# Altium footprint library WR-TBL_Pluggable Connector_3.50mm.PcbLib: 175 footprints (part 4 of 11)
Each footprint in its own frame and in the unit in brackets; x right, y up, seen from the top. Pads: shape width x height; smd on the part's side, far side on the other; paste and mask are expansions set on the pad; w line width, h text height; cw(c..) or ccw(c..) is an arc to the next point about the centre after c.
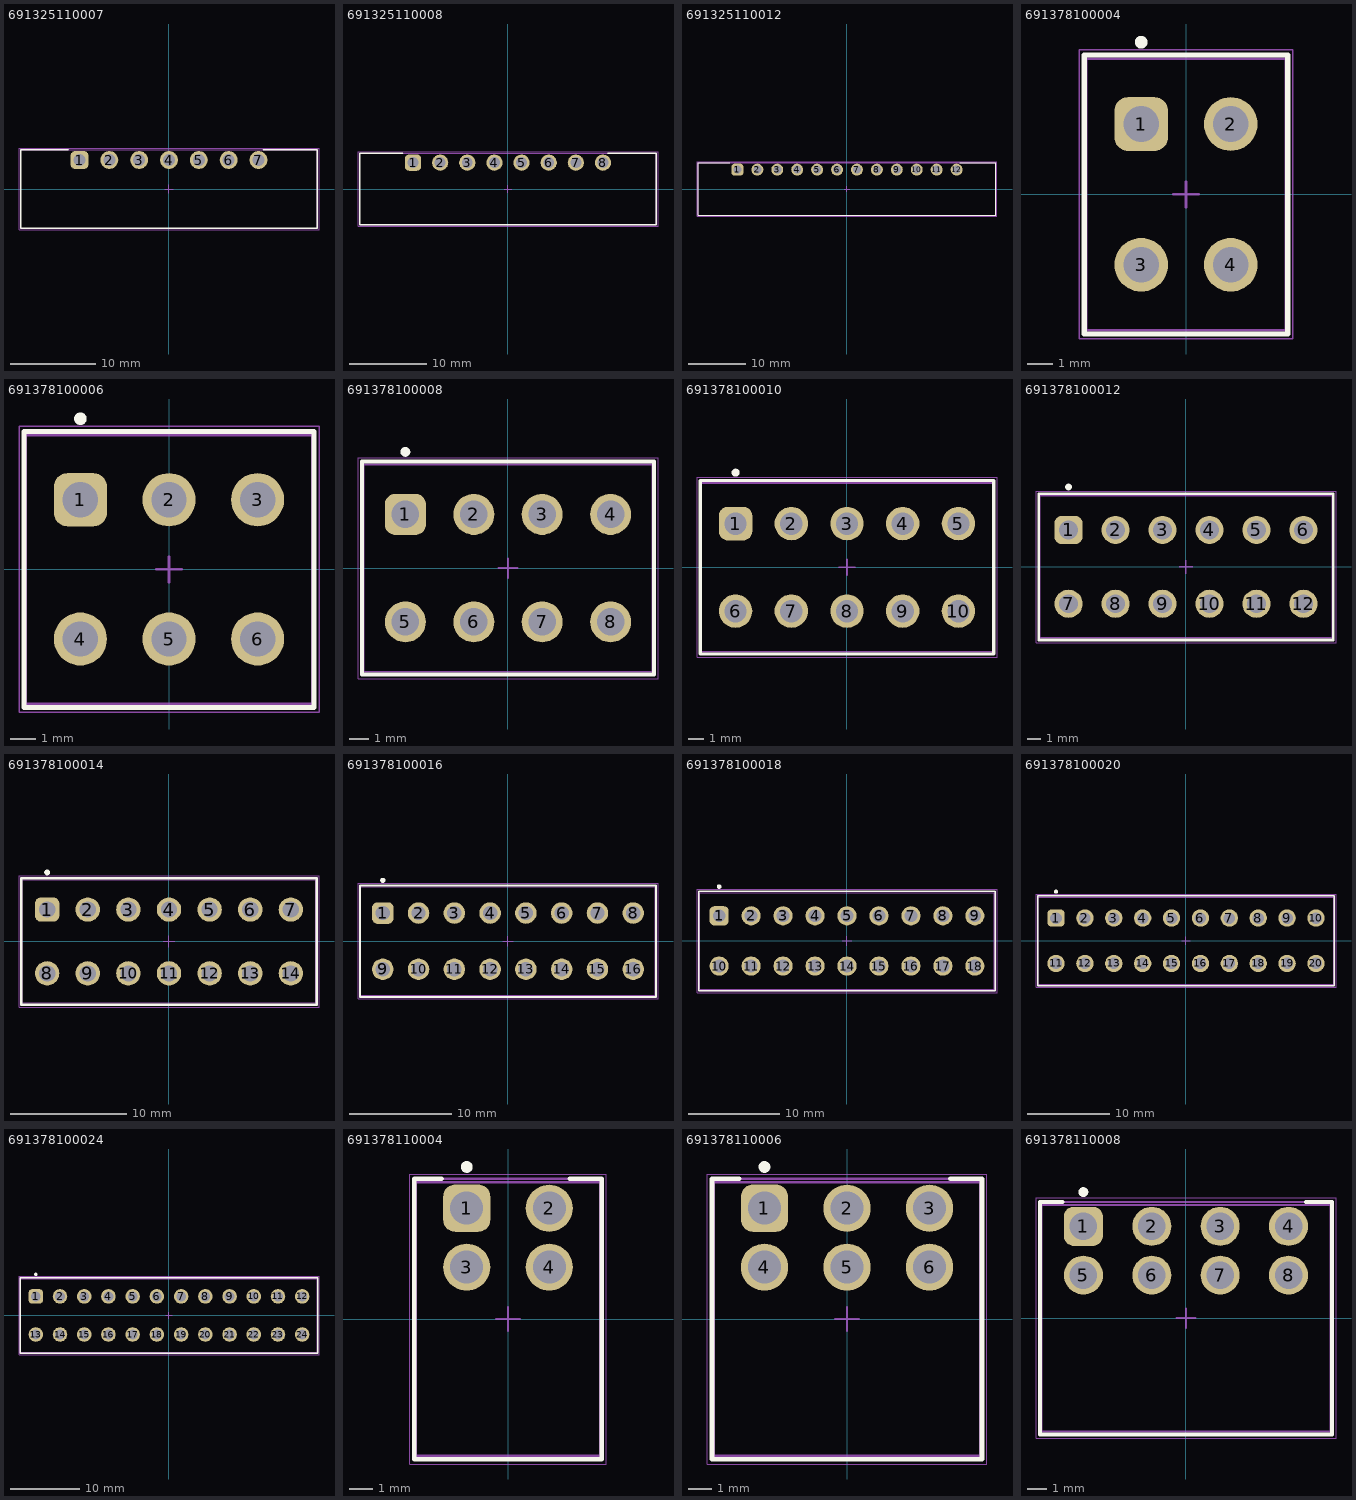
[diagram p3: the footprints below, top view; thin cyan lines are the x and y axes]

## 691325110007 [mm] "Horizontal PCB Header with Flanges, pitch 3.5mm, 07p"
height 7.2
pads (7):
  rrect50% 2.1x2.1 hole 1.4: 1(-10.5,3.4)
  round 2.1 hole 1.4: 2(-7,3.4) 3(-3.5,3.4) 4(0,3.4) 5(3.5,3.4) 6(7,3.4) 7(10.5,3.4)
Top Overlay:
  lines w0.2: -11.85,4.6 -17.4,4.6 -17.4,-4.6 17.4,-4.6 17.4,4.6 11.1,4.6
Top Assembly:
  lines w0.1: -17.4,-4.6 17.4,-4.6 17.4,4.6 -17.4,4.6 -17.4,-4.6
Top Designator:
  text ".Designator" at -3.647,-0.357 h1
Top 3D Body:
  lines w0.1: -17.4,-4.6 -17.4,4.6 17.4,4.6 17.4,-4.6 -17.4,-4.6
Top Courtyard:
  lines w0.05: -17.6,-4.8 -17.6,4.8 17.6,4.8 17.6,-4.8 -17.6,-4.8
Top Component Center:
  lines w0.1: -0.5,0 0.5,0 ; 0,-0.5 0,0.5
3D body "691325110007.stp": height 7.3, standoff -3.4, extent -17.4,-4.6 17.4,4.6

## 691325110008 [mm] "Horizontal PCB Header with Flanges, pitch 3.5mm, 08p"
height 7.2
pads (8):
  rrect50% 2.1x2.1 hole 1.4: 1(-12.25,3.4)
  round 2.1 hole 1.4: 2(-8.75,3.4) 3(-5.25,3.4) 4(-1.75,3.4) 5(1.75,3.4) 6(5.25,3.4) 7(8.75,3.4) 8(12.25,3.4)
Top Overlay:
  lines w0.2: -13.6,4.6 -19.15,4.6 -19.15,-4.6 19.15,-4.6 19.15,4.6 12.85,4.6
Top Assembly:
  lines w0.1: -19.15,-4.6 -19.15,4.6 19.15,4.6 19.15,-4.6 -19.15,-4.6
Top Designator:
  text ".Designator" at -3.647,-0.357 h1
Top 3D Body:
  lines w0.1: -19.15,-4.6 19.15,-4.6 19.15,4.6 -19.15,4.6 -19.15,-4.6
Top Courtyard:
  lines w0.05: -19.35,-4.8 19.35,-4.8 19.35,4.8 -19.35,4.8 -19.35,-4.8
Top Component Center:
  lines w0.1: -0.5,0 0.5,0 ; 0,-0.5 0,0.5
3D body "691325110008.stp": height 7.3, standoff -3.4, extent -19.15,-4.6 19.15,4.6

## 691325110012 [mm] "Horizontal PCB Header with Flanges, pitch 3.5mm, 12p"
height 7.2
pads (12):
  rrect50% 2.1x2.1 hole 1.4: 1(-19.25,3.4)
  round 2.1 hole 1.4: 2(-15.75,3.4) 3(-12.25,3.4) 4(-8.75,3.4) 5(-5.25,3.4) 6(-1.75,3.4) 7(1.75,3.4) 8(5.25,3.4) 9(8.75,3.4) 10(12.25,3.4) 11(15.75,3.4) 12(19.25,3.4)
Top Overlay:
  lines w0.2: -20.6,4.6 -26.15,4.6 -26.15,-4.6 26.15,-4.6 26.15,4.6 19.85,4.6
Top Assembly:
  lines w0.1: -26.15,-4.6 26.15,-4.6 26.15,4.6 -26.15,4.6 -26.15,-4.6
Top Designator:
  text ".Designator" at -3.647,-0.357 h1
Top 3D Body:
  lines w0.1: -26.15,-4.6 -26.15,4.6 26.15,4.6 26.15,-4.6 -26.15,-4.6
Top Courtyard:
  lines w0.05: -26.35,-4.8 -26.35,4.8 26.35,4.8 26.35,-4.8 -26.35,-4.8
Top Component Center:
  lines w0.1: -0.5,0 0.5,0 ; 0,-0.5 0,0.5
3D body "691325110012.stp": height 7.3, standoff -3.4, extent -26.15,-4.6 26.15,4.6

## 691378100004 [mm] "PCB Header, Horizontal, pitch 3.5mm, 04p"
height 10
pads (4):
  rrect50% 2.1x2.1 hole 1.4: 1(-1.75,2.75)
  round 2.1 hole 1.4: 2(1.75,2.75) 3(-1.75,-2.75) 4(1.75,-2.75)
Top Overlay:
  circle w0.25: c-1.75,5.95 r0.125
  lines w0.2: -3.975,-5.45 -3.975,5.45 3.975,5.45 3.975,-5.45 -3.975,-5.45
Top Assembly:
  lines w0.1: -3.975,-5.45 -3.975,5.45 3.975,5.45 3.975,-5.45 -3.975,-5.45
Top Designator:
  text ".Designator" at -3.647,-0.357 h1
Top 3D Body:
  lines w0.1: -3.9,-5.3 3.9,-5.3 3.9,5.3 -3.9,5.3 -3.9,-5.3
Top Courtyard:
  lines w0.05: -4.175,-5.65 4.175,-5.65 4.175,5.65 -4.175,5.65 -4.175,-5.65
Top Component Center:
  lines w0.1: -0.5,0 0.5,0 ; 0,-0.5 0,0.5
3D body "691378100004.stp": height 10.05, standoff -3.45, extent -3.9,-5.3 3.9,5.3

## 691378100006 [mm] "PCB Header, Horizontal, pitch 3.5mm, 06p"
height 10
pads (6):
  rrect50% 2.1x2.1 hole 1.4: 1(-3.5,2.75)
  round 2.1 hole 1.4: 2(0,2.75) 3(3.5,2.75) 4(-3.5,-2.75) 5(0,-2.75) 6(3.5,-2.75)
Top Overlay:
  circle w0.25: c-3.5,5.95 r0.125
  lines w0.2: -5.725,-5.45 -5.725,5.45 5.725,5.45 5.725,-5.45 -5.725,-5.45
Top Assembly:
  lines w0.1: -5.725,-5.45 -5.725,5.45 5.725,5.45 5.725,-5.45 -5.725,-5.45
Top Designator:
  text ".Designator" at -3.647,-0.357 h1
Top 3D Body:
  lines w0.1: -5.65,-5.3 5.65,-5.3 5.65,5.3 -5.65,5.3 -5.65,-5.3
Top Courtyard:
  lines w0.05: -5.925,-5.65 5.925,-5.65 5.925,5.65 -5.925,5.65 -5.925,-5.65
Top Component Center:
  lines w0.1: -0.5,0 0.5,0 ; 0,-0.5 0,0.5
3D body "691378100006.stp": height 10.05, standoff -3.45, extent -5.65,-5.3 5.65,5.3

## 691378100008 [mm] "PCB Header, Horizontal, pitch 3.5mm, 08p"
height 10
pads (8):
  rrect50% 2.1x2.1 hole 1.4: 1(-5.25,2.75)
  round 2.1 hole 1.4: 2(-1.75,2.75) 3(1.75,2.75) 4(5.25,2.75) 5(-5.25,-2.75) 6(-1.75,-2.75) 7(1.75,-2.75) 8(5.25,-2.75)
Top Overlay:
  circle w0.25: c-5.25,5.95 r0.125
  lines w0.2: -7.475,-5.45 7.475,-5.45 7.475,5.45 -7.475,5.45 -7.475,-5.45
Top Assembly:
  lines w0.1: -7.475,-5.45 7.475,-5.45 7.475,5.45 -7.475,5.45 -7.475,-5.45
Top Designator:
  text ".Designator" at -3.647,-0.357 h1
Top 3D Body:
  lines w0.1: -7.4,-5.3 -7.4,5.3 7.4,5.3 7.4,-5.3 -7.4,-5.3
Top Courtyard:
  lines w0.05: -7.675,-5.65 -7.675,5.65 7.675,5.65 7.675,-5.65 -7.675,-5.65
Top Component Center:
  lines w0.1: -0.5,0 0.5,0 ; 0,-0.5 0,0.5
3D body "691378100008.stp": height 10.05, standoff -3.45, extent -7.4,-5.3 7.4,5.3

## 691378100010 [mm] "PCB Header, Horizontal, pitch 3.5mm, 10p"
height 10
pads (10):
  rrect50% 2.1x2.1 hole 1.4: 1(-7,2.75)
  round 2.1 hole 1.4: 2(-3.5,2.75) 3(0,2.75) 4(3.5,2.75) 5(7,2.75) 6(-7,-2.75) 7(-3.5,-2.75) 8(0,-2.75) 9(3.5,-2.75) 10(7,-2.75)
Top Overlay:
  circle w0.25: c-7,5.95 r0.125
  lines w0.2: -9.225,-5.45 9.225,-5.45 9.225,5.45 -9.225,5.45 -9.225,-5.45
Top Assembly:
  lines w0.1: -9.225,-5.45 9.225,-5.45 9.225,5.45 -9.225,5.45 -9.225,-5.45
Top Designator:
  text ".Designator" at -3.647,-0.357 h1
Top 3D Body:
  lines w0.1: -9.15,-5.3 9.15,-5.3 9.15,5.3 -9.15,5.3 -9.15,-5.3
Top Courtyard:
  lines w0.05: -9.425,-5.65 -9.425,5.65 9.425,5.65 9.425,-5.65 -9.425,-5.65
Top Component Center:
  lines w0.1: -0.5,0 0.5,0 ; 0,-0.5 0,0.5
3D body "691378100010.stp": height 10.05, standoff -3.45, extent -9.15,-5.3 9.15,5.3

## 691378100012 [mm] "PCB Header, Horizontal, pitch 3.5mm, 12p"
height 10
pads (12):
  rrect50% 2.1x2.1 hole 1.4: 1(-8.75,2.75)
  round 2.1 hole 1.4: 2(-5.25,2.75) 3(-1.75,2.75) 4(1.75,2.75) 5(5.25,2.75) 6(8.75,2.75) 7(-8.75,-2.75) 8(-5.25,-2.75) 9(-1.75,-2.75) 10(1.75,-2.75) 11(5.25,-2.75) 12(8.75,-2.75)
Top Overlay:
  circle w0.25: c-8.75,5.95 r0.125
  lines w0.2: -10.975,-5.45 -10.975,5.45 10.975,5.45 10.975,-5.45 -10.975,-5.45
Top Assembly:
  lines w0.1: -10.975,-5.45 -10.975,5.45 10.975,5.45 10.975,-5.45 -10.975,-5.45
Top Designator:
  text ".Designator" at -3.647,-0.357 h1
Top 3D Body:
  lines w0.1: -10.9,-5.3 -10.9,5.3 10.9,5.3 10.9,-5.3 -10.9,-5.3
Top Courtyard:
  lines w0.05: -11.175,-5.65 11.175,-5.65 11.175,5.65 -11.175,5.65 -11.175,-5.65
Top Component Center:
  lines w0.1: -0.5,0 0.5,0 ; 0,-0.5 0,0.5
3D body "691378100012.stp": height 10.05, standoff -3.45, extent -10.9,-5.3 10.9,5.3

## 691378100014 [mm] "PCB Header, Horizontal, pitch 3.5mm, 14p"
height 10
pads (14):
  rrect50% 2.1x2.1 hole 1.4: 1(-10.5,2.75)
  round 2.1 hole 1.4: 2(-7,2.75) 3(-3.5,2.75) 4(0,2.75) 5(3.5,2.75) 6(7,2.75) 7(10.5,2.75) 8(-10.5,-2.75) 9(-7,-2.75) 10(-3.5,-2.75) 11(0,-2.75) 12(3.5,-2.75) 13(7,-2.75) 14(10.5,-2.75)
Top Overlay:
  circle w0.25: c-10.5,5.95 r0.125
  lines w0.2: -12.725,-5.45 -12.725,5.45 12.725,5.45 12.725,-5.45 -12.725,-5.45
Top Assembly:
  lines w0.1: -12.725,-5.45 -12.725,5.45 12.725,5.45 12.725,-5.45 -12.725,-5.45
Top Designator:
  text ".Designator" at -3.647,-0.357 h1
Top 3D Body:
  lines w0.1: -12.65,-5.3 -12.65,5.3 12.65,5.3 12.65,-5.3 -12.65,-5.3
Top Courtyard:
  lines w0.05: -12.925,-5.65 12.925,-5.65 12.925,5.65 -12.925,5.65 -12.925,-5.65
Top Component Center:
  lines w0.1: -0.5,0 0.5,0 ; 0,-0.5 0,0.5
3D body "691378100014.stp": height 10.05, standoff -3.45, extent -12.65,-5.3 12.65,5.3

## 691378100016 [mm] "PCB Header, Horizontal, pitch 3.5mm, 16p"
height 10
pads (16):
  rrect50% 2.1x2.1 hole 1.4: 1(-12.25,2.75)
  round 2.1 hole 1.4: 2(-8.75,2.75) 3(-5.25,2.75) 4(-1.75,2.75) 5(1.75,2.75) 6(5.25,2.75) 7(8.75,2.75) 8(12.25,2.75) 9(-12.25,-2.75) 10(-8.75,-2.75) 11(-5.25,-2.75) 12(-1.75,-2.75) 13(1.75,-2.75) 14(5.25,-2.75) 15(8.75,-2.75) 16(12.25,-2.75)
Top Overlay:
  circle w0.25: c-12.25,5.95 r0.125
  lines w0.2: -14.475,-5.45 -14.475,5.45 14.475,5.45 14.475,-5.45 -14.475,-5.45
Top Assembly:
  lines w0.1: -14.475,-5.45 -14.475,5.45 14.475,5.45 14.475,-5.45 -14.475,-5.45
Top Designator:
  text ".Designator" at -3.647,-0.357 h1
Top 3D Body:
  lines w0.1: -14.4,-5.3 -14.4,5.3 14.4,5.3 14.4,-5.3 -14.4,-5.3
Top Courtyard:
  lines w0.05: -14.675,-5.65 14.675,-5.65 14.675,5.65 -14.675,5.65 -14.675,-5.65
Top Component Center:
  lines w0.1: -0.5,0 0.5,0 ; 0,-0.5 0,0.5
3D body "691378100016.stp": height 10.05, standoff -3.45, extent -14.4,-5.3 14.4,5.3

## 691378100018 [mm] "PCB Header, Horizontal, pitch 3.5mm, 18p"
height 10
pads (18):
  rrect50% 2.1x2.1 hole 1.4: 1(-14,2.75)
  round 2.1 hole 1.4: 2(-10.5,2.75) 3(-7,2.75) 4(-3.5,2.75) 5(0,2.75) 6(3.5,2.75) 7(7,2.75) 8(10.5,2.75) 9(14,2.75) 10(-14,-2.75) 11(-10.5,-2.75) 12(-7,-2.75) 13(-3.5,-2.75) 14(0,-2.75) 15(3.5,-2.75) 16(7,-2.75) 17(10.5,-2.75) 18(14,-2.75)
Top Overlay:
  circle w0.25: c-14,5.95 r0.125
  lines w0.2: -16.225,-5.45 -16.225,5.45 16.225,5.45 16.225,-5.45 -16.225,-5.45
Top Assembly:
  lines w0.1: -16.225,-5.45 -16.225,5.45 16.225,5.45 16.225,-5.45 -16.225,-5.45
Top Designator:
  text ".Designator" at -3.647,-0.357 h1
Top 3D Body:
  lines w0.1: -16.15,-5.3 -16.15,5.3 16.15,5.3 16.15,-5.3 -16.15,-5.3
Top Courtyard:
  lines w0.05: -16.425,-5.65 16.425,-5.65 16.425,5.65 -16.425,5.65 -16.425,-5.65
Top Component Center:
  lines w0.1: -0.5,0 0.5,0 ; 0,-0.5 0,0.5
3D body "691378100018.stp": height 10.05, standoff -3.45, extent -16.15,-5.3 16.15,5.3

## 691378100020 [mm] "PCB Header, Horizontal, pitch 3.5mm, 20p"
height 10
pads (20):
  rrect50% 2.1x2.1 hole 1.4: 1(-15.75,2.75)
  round 2.1 hole 1.4: 2(-12.25,2.75) 3(-8.75,2.75) 4(-5.25,2.75) 5(-1.75,2.75) 6(1.75,2.75) 7(5.25,2.75) 8(8.75,2.75) 9(12.25,2.75) 10(15.75,2.75) 11(-15.75,-2.75) 12(-12.25,-2.75) 13(-8.75,-2.75) 14(-5.25,-2.75) 15(-1.75,-2.75) 16(1.75,-2.75) 17(5.25,-2.75) 18(8.75,-2.75) 19(12.25,-2.75) 20(15.75,-2.75)
Top Overlay:
  circle w0.25: c-15.75,5.95 r0.125
  lines w0.2: -17.975,-5.45 17.975,-5.45 17.975,5.45 -17.975,5.45 -17.975,-5.45
Top Assembly:
  lines w0.1: -17.975,-5.45 17.975,-5.45 17.975,5.45 -17.975,5.45 -17.975,-5.45
Top Designator:
  text ".Designator" at -3.647,-0.357 h1
Top 3D Body:
  lines w0.1: -17.9,-5.3 17.9,-5.3 17.9,5.3 -17.9,5.3 -17.9,-5.3
Top Courtyard:
  lines w0.05: -18.175,-5.65 -18.175,5.65 18.175,5.65 18.175,-5.65 -18.175,-5.65
Top Component Center:
  lines w0.1: -0.5,0 0.5,0 ; 0,-0.5 0,0.5
3D body "691378100020.stp": height 10.05, standoff -3.45, extent -17.9,-5.3 17.9,5.3

## 691378100024 [mm] "PCB Header, Horizontal, pitch 3.5mm, 24p"
height 10
pads (24):
  rrect50% 2.1x2.1 hole 1.4: 1(-19.25,2.75)
  round 2.1 hole 1.4: 2(-15.75,2.75) 3(-12.25,2.75) 4(-8.75,2.75) 5(-5.25,2.75) 6(-1.75,2.75) 7(1.75,2.75) 8(5.25,2.75) 9(8.75,2.75) 10(12.25,2.75) 11(15.75,2.75) 12(19.25,2.75) 13(-19.25,-2.75) 14(-15.75,-2.75) 15(-12.25,-2.75) 16(-8.75,-2.75) 17(-5.25,-2.75) 18(-1.75,-2.75) 19(1.75,-2.75) 20(5.25,-2.75) 21(8.75,-2.75) 22(12.25,-2.75) 23(15.75,-2.75) 24(19.25,-2.75)
Top Overlay:
  circle w0.25: c-19.25,5.95 r0.125
  lines w0.2: -21.475,-5.45 21.475,-5.45 21.475,5.45 -21.475,5.45 -21.475,-5.45
Top Assembly:
  lines w0.1: -21.475,-5.45 21.475,-5.45 21.475,5.45 -21.475,5.45 -21.475,-5.45
Top Designator:
  text ".Designator" at -3.647,-0.357 h1
Top 3D Body:
  lines w0.1: -21.4,-5.3 21.4,-5.3 21.4,5.3 -21.4,5.3 -21.4,-5.3
Top Courtyard:
  lines w0.05: -21.675,-5.65 -21.675,5.65 21.675,5.65 21.675,-5.65 -21.675,-5.65
Top Component Center:
  lines w0.1: -0.5,0 0.5,0 ; 0,-0.5 0,0.5
3D body "691378100024.stp": height 10.05, standoff -3.45, extent -21.4,-5.3 21.4,5.3

## 691378110004 [mm] "PCB Header, Horizontal, pitch 3.5mm, 04p"
height 10.8
pads (4):
  rrect50% 2x2 hole 1.4: 1(-1.75,4.7)
  round 2 hole 1.4: 2(1.75,4.7) 3(-1.75,2.2) 4(1.75,2.2)
Top Overlay:
  circle w0.25: c-1.75,6.45 r0.125
  lines w0.2: -2.825,5.95 -3.975,5.95 -3.975,-5.95 3.975,-5.95 3.975,5.95 2.625,5.95
Top Assembly:
  lines w0.1: -3.975,-5.95 3.975,-5.95 3.975,5.95 -3.975,5.95 -3.975,-5.95
Top Designator:
  text ".Designator" at -3.647,-0.357 h1
Top 3D Body:
  lines w0.1: -3.9,-5.8 3.9,-5.8 3.9,5.8 -3.9,5.8 -3.9,-5.8
Top Courtyard:
  lines w0.05: -4.175,-6.15 4.175,-6.15 4.175,6.15 -4.175,6.15 -4.175,-6.15
Top Component Center:
  lines w0.1: -0.5,0 0.5,0 ; 0,-0.5 0,0.5
3D body "691378110004.stp": height 10.9, standoff -3.4, extent -3.9,-5.8 3.9,5.8

## 691378110006 [mm] "PCB Header, Horizontal, pitch 3.5mm, 06p"
height 10.8
pads (6):
  rrect50% 2x2 hole 1.4: 1(-3.5,4.7)
  round 2 hole 1.4: 2(0,4.7) 3(3.5,4.7) 4(-3.5,2.2) 5(0,2.2) 6(3.5,2.2)
Top Overlay:
  circle w0.25: c-3.5,6.45 r0.125
  lines w0.2: -4.575,5.95 -5.725,5.95 -5.725,-5.95 5.725,-5.95 5.725,5.95 4.375,5.95
Top Assembly:
  lines w0.1: -5.725,-5.95 -5.725,5.95 5.725,5.95 5.725,-5.95 -5.725,-5.95
Top Designator:
  text ".Designator" at -3.647,-0.357 h1
Top 3D Body:
  lines w0.1: -5.65,-5.8 -5.65,5.8 5.65,5.8 5.65,-5.8 -5.65,-5.8
Top Courtyard:
  lines w0.05: -5.925,-6.15 -5.925,6.15 5.925,6.15 5.925,-6.15 -5.925,-6.15
Top Component Center:
  lines w0.1: -0.5,0 0.5,0 ; 0,-0.5 0,0.5
3D body "691378110006.stp": height 10.9, standoff -3.4, extent -5.65,-5.8 5.65,5.8

## 691378110008 [mm] "PCB Header, Horizontal, pitch 3.5mm, 08p"
height 10.8
pads (8):
  rrect50% 2x2 hole 1.4: 1(-5.25,4.7)
  round 2 hole 1.4: 2(-1.75,4.7) 3(1.75,4.7) 4(5.25,4.7) 5(-5.25,2.2) 6(-1.75,2.2) 7(1.75,2.2) 8(5.25,2.2)
Top Overlay:
  circle w0.25: c-5.25,6.45 r0.125
  lines w0.2: -6.325,5.95 -7.475,5.95 -7.475,-5.95 7.475,-5.95 7.475,5.95 6.125,5.95
Top Assembly:
  lines w0.1: -7.475,-5.95 7.475,-5.95 7.475,5.95 -7.475,5.95 -7.475,-5.95
Top Designator:
  text ".Designator" at -3.647,-0.357 h1
Top 3D Body:
  lines w0.1: -7.4,-5.8 7.4,-5.8 7.4,5.8 -7.4,5.8 -7.4,-5.8
Top Courtyard:
  lines w0.05: -7.675,-6.15 7.675,-6.15 7.675,6.15 -7.675,6.15 -7.675,-6.15
Top Component Center:
  lines w0.1: -0.5,0 0.5,0 ; 0,-0.5 0,0.5
3D body "691378110008.stp": height 10.9, standoff -3.4, extent -7.4,-5.8 7.4,5.8